# EAGLE library part ST490ABDR (library ST490ABDR)
ST490ABDR, Line Transceiver, RS-485, RS-422 50Mbit/s Differential, 5 V, 8-Pin SO Source: Datasheet <http://www.st.com/st-web-ui/static/active/en/resource/technical/document/datasheet/CD00003152.pdf>
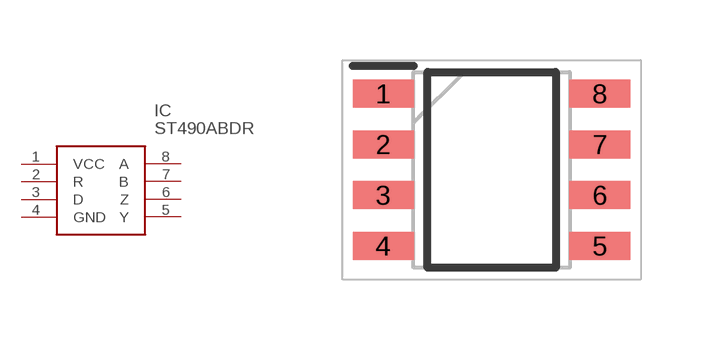
[diagram p0: symbol with the pads of SOIC127P600X175-8N; footprint SOIC127P600X175-8N]

Designator prefix IC

## ST490ABDR (Arrow_Part_Number: ST490ABDR; Arrow_Price-Stock: https://www.arrow.com/en/products/st490abdr/stmicroelectronics; Description: ST490ABDR, Line Transceiver, RS-485, RS-422 50Mbit/s Differential, 5 V, 8-Pin SO; Height: 1.75mm; Manufacturer_Name: STMicroelectronics; Manufacturer_Part_Number: ST490ABDR; Mouser_Part_Number: 511-ST490ABDR; Mouser_Price-Stock: https://www.mouser.co.uk/ProductDetail/STMicroelectronics/ST490ABDR?qs=OA2by1ti9iHzlIjKWM8I4A%3D%3D)  [SOIC127P600X175-8N]
1  VCC
2  R
3  D
4  GND
5  Y
6  Z
7  B
8  A

## Footprint SOIC127P600X175-8N (pad centres in mm)
SO--8
smd 1.525 x 0.7: 1 -2.712,1.905; 2 -2.712,0.635; 3 -2.712,-0.635; 4 -2.712,-1.905; 5 2.712,-1.905; 6 2.712,-0.635; 7 2.712,0.635; 8 2.712,1.905